# Altium schematic symbol library SMBJ9P0A.SchLib: 1 symbol
Pins are listed as number, name and electrical type; pins without a type are passive.

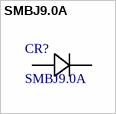
[diagram p0: symbol SMBJ9.0A]

## SMBJ9.0A
designator CR?
Description; Manufacturer_Name: Littelfuse Inc; Copyright: Copyright (C) 2025 Ultra Librarian. All rights reserved.; Manufacturer_Part_Number: SMBJ9.0A
footprint SMBJSeries_LTF
pins: 1, 2